# Altium footprint library SS8050 Y1_C42441445.PcbLib: 1 footprints
Each footprint in its own frame and in the unit in brackets; x right, y up, seen from the top. Pads: shape width x height; smd on the part's side, far side on the other; paste and mask are expansions set on the pad; w line width, h text height; cw(c..) or ccw(c..) is an arc to the next point about the centre after c.
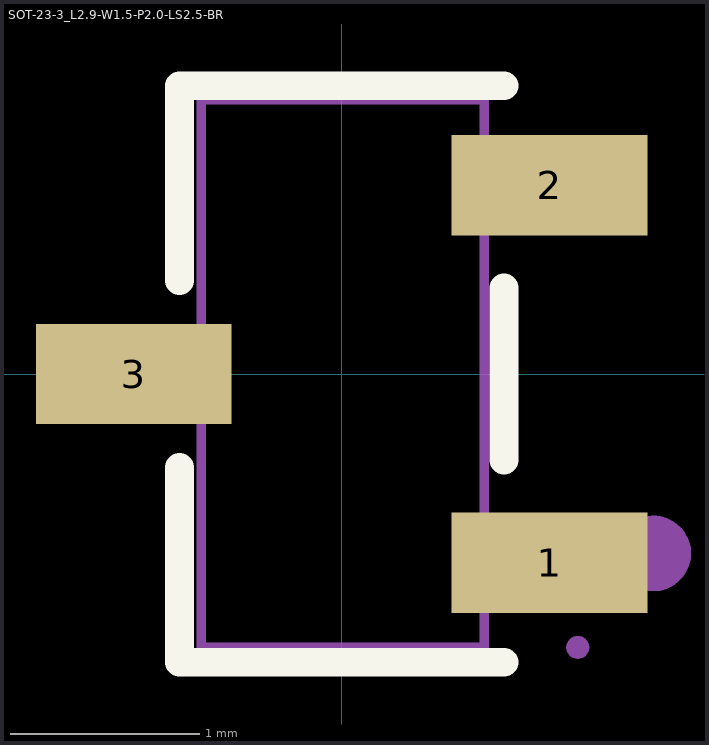
[diagram p0: the footprint, top view; thin cyan lines are the x and y axes]

## SOT-23-3_L2.9-W1.5-P2.0-LS2.5-BR [mm]
pads (3):
  rect 1.037x0.532 smd: 1(1.101,-1) 2(1.101,1) 3(-1.101,0)
Top Overlay:
  lines w0.152: -0.859,-0.495 -0.859,-1.526 0.859,-1.526 ; -0.859,0.495 -0.859,1.526 0.859,1.526 ; 0.859,-0.455 0.859,0.455
Mechanical 2:
  circle w0.2: c1.65,-0.95 r0.1
Mechanical 6:
  lines w0.051: -0.745,-1.448 -0.745,1.452 0.755,1.452 0.755,-1.448 -0.745,-1.448
Mechanical 7:
  region: 0.74,-1.2 0.74,-0.8 0.86,-0.8 0.86,-1.2
  region: 0.74,0.8 0.74,1.2 0.86,1.2 0.86,0.8
  region: -0.86,-0.2 -0.86,0.2 -0.74,0.2 -0.74,-0.2
Mechanical 8:
  region: 1.31,-1.448 1.31,-1.453 1.309,-1.462 1.306,-1.471 1.301,-1.479 1.296,-1.487 1.289,-1.494 1.281,-1.499 1.273,-1.503 1.264,-1.506 1.255,-1.508 1.245,-1.508 1.236,-1.506 1.227,-1.503 1.219,-1.499 1.211,-1.494 1.204,-1.487 1.199,-1.479 1.194,-1.471 1.192,-1.462 1.19,-1.453 1.19,-1.448 1.19,-1.443 1.192,-1.434 1.194,-1.425 1.199,-1.416 1.204,-1.409 1.211,-1.402 1.219,-1.397 1.227,-1.392 1.236,-1.389 1.245,-1.388 1.255,-1.388 1.264,-1.389 1.273,-1.392 1.281,-1.397 1.289,-1.402 1.296,-1.409 1.301,-1.416 1.306,-1.425 1.309,-1.434 1.31,-1.443 1.31,-1.448
Mechanical 9:
  region: 0.85,-1.2 0.85,-0.8 1.25,-0.8 1.25,-1.2
  region: 0.85,0.8 0.85,1.2 1.25,1.2 1.25,0.8
  region: -1.25,-0.2 -1.25,0.2 -0.85,0.2 -0.85,-0.2